# Altium schematic symbol library HEADER-PH2.0-6P.SchLib: 1 symbol
Pins are listed as number, name and electrical type; pins without a type are passive.

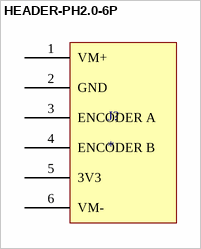
[diagram p0: symbol HEADER-PH2.0-6P]

## HEADER-PH2.0-6P
designator J?
CONNECTOR
footprint HEADER-PH2.0-6P (HEADER KẾT NỐI PCB VÀ DC MOTOR)
pins: 1 VM+, 2 GND, 3 ENCODER A, 4 ENCODER B, 5 3V3, 6 VM-